# Altium footprint library HR961160C.PcbLib: 1 footprints
Each footprint in its own frame and in the unit in brackets; x right, y up, seen from the top. Pads: shape width x height; smd on the part's side, far side on the other; paste and mask are expansions set on the pad; w line width, h text height; cw(c..) or ccw(c..) is an arc to the next point about the centre after c.
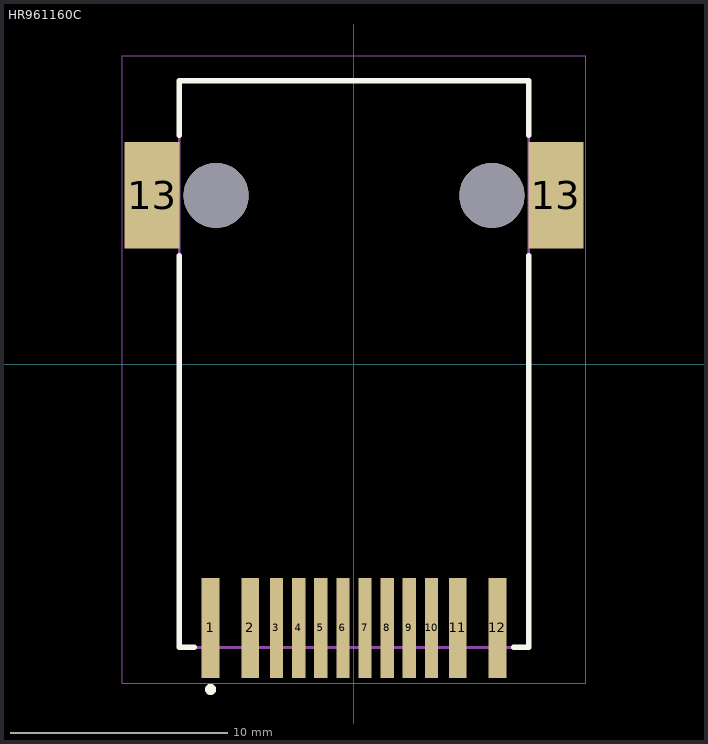
[diagram p0: the footprint, top view; thin cyan lines are the x and y axes]

## HR961160C [mm]
height 15.63
pads (16):
  rect 0.81x4.6 smd: 1(-6.61,-12.15) 2(-4.77,-12.15) 11(4.77,-12.15) 12(6.61,-12.15)
  rect 0.61x4.6 smd: 3(-3.57,-12.15) 4(-2.55,-12.15) 5(-1.53,-12.15) 6(-0.51,-12.15) 7(0.51,-12.15) 8(1.53,-12.15) 9(2.55,-12.15) 10(3.57,-12.15)
  rect 2.54x4.9 smd: 13(-9.3,7.77) 13(9.3,7.77)
  round 3 hole 3 unplated: ""(-6.35,7.77) ""(6.35,7.77)
Top Overlay:
  circle w0.254: c-6.604,-14.986 r0.127
  lines w0.254: -8.05,5 -8.05,-13.05 -7.366,-13.05 ; -8.05,10.54 -8.05,13.05 8.05,13.05 8.05,10.54 ; 7.366,-13.05 8.05,-13.05 8.05,5
Mechanical 13:
  lines w0.127: -8.05,-13.05 8.05,-13.05 8.05,13.05 -8.05,13.05 -8.05,-13.05
Mechanical 15:
  lines w0.05: -10.67,-14.7 -10.67,14.2 10.67,14.2 10.67,-14.7 -10.67,-14.7
3D body "step_temp.STEP": height 15.33, standoff -1, extent -9.57,-13.96 9.57,13.575